# Altium footprint library MyPCBLib.PcbLib: 103 footprints (part 4 of 7)
Each footprint in its own frame and in the unit in brackets; x right, y up, seen from the top. Pads: shape width x height; smd on the part's side, far side on the other; paste and mask are expansions set on the pad; w line width, h text height; cw(c..) or ccw(c..) is an arc to the next point about the centre after c.
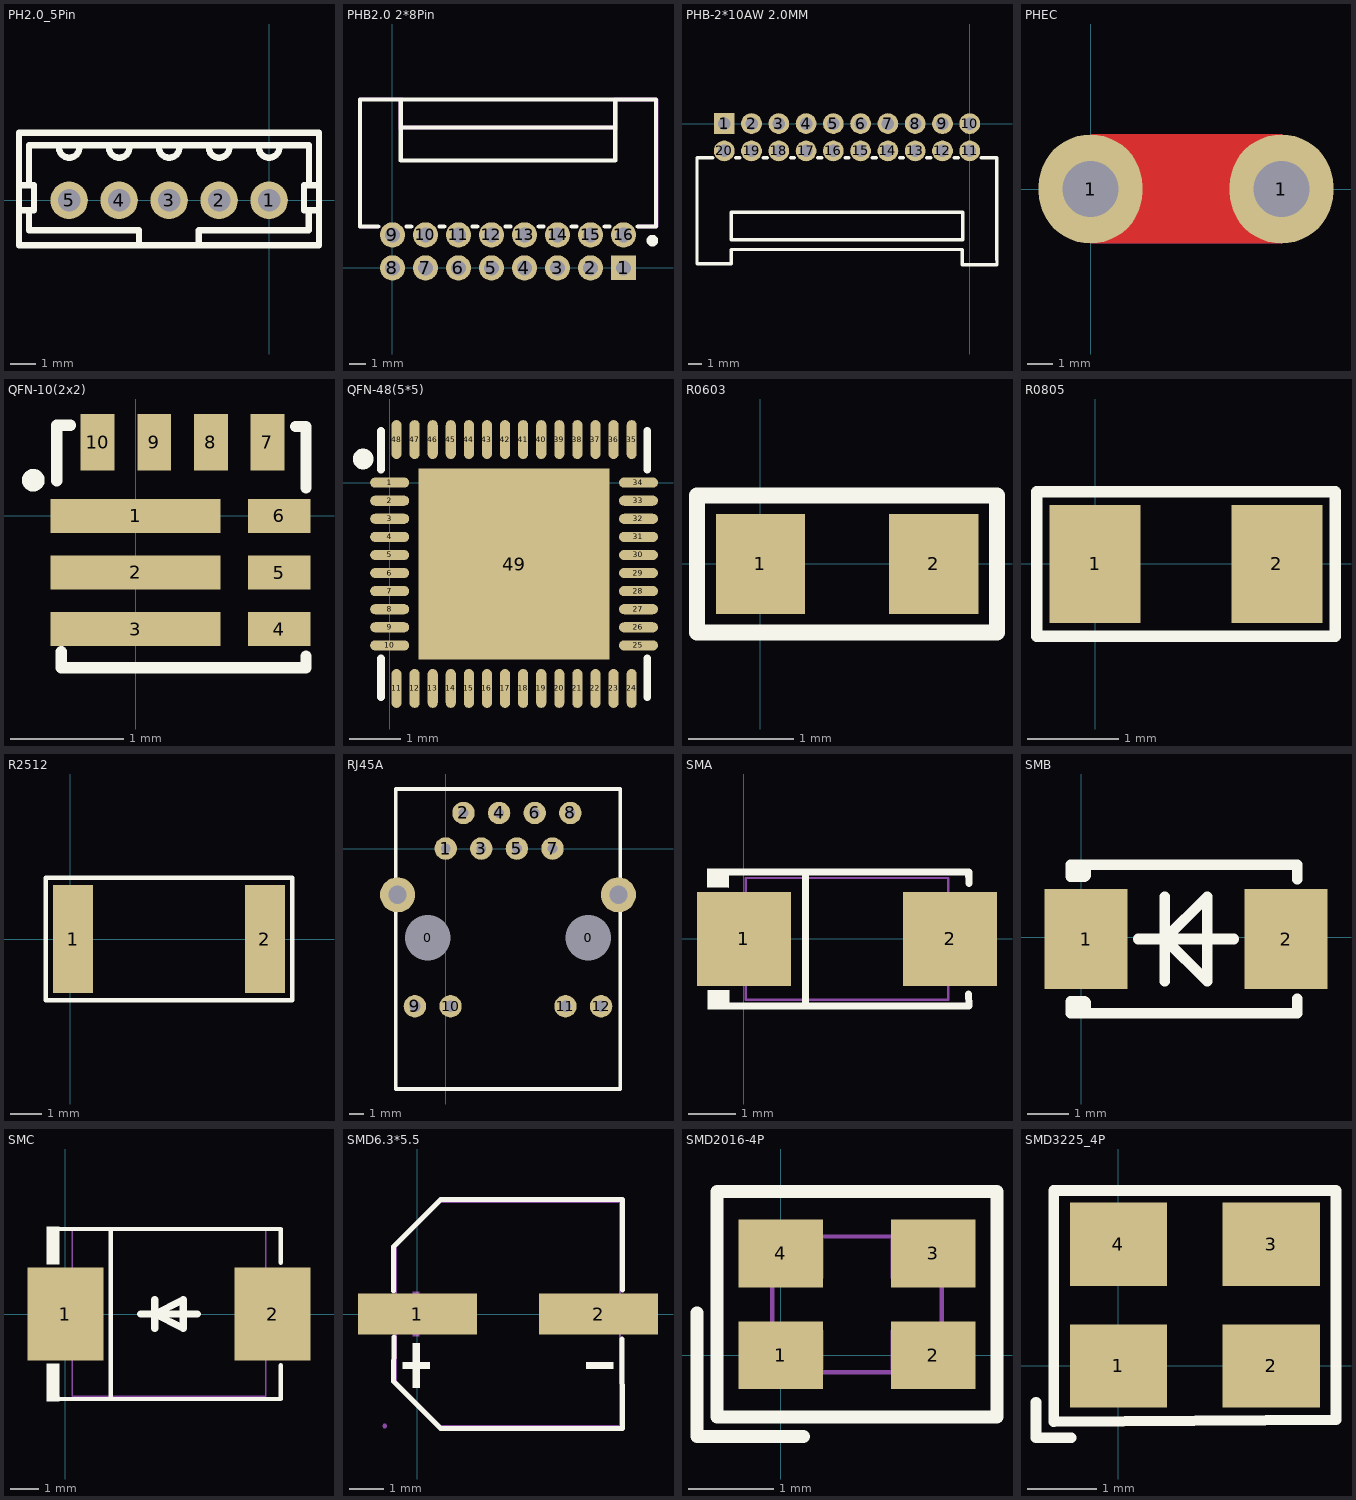
[diagram p3: the footprints below, top view; thin cyan lines are the x and y axes]

## PH2.0_5Pin [mm]
pads (5):
  round 1.5 hole 0.9: 1(0,0) 2(-2,0) 3(-4,0) 4(-6,0) 5(-8,0)
Top Overlay:
  lines w0.254: -10.002,-0.399 -9.402,-0.399 -9.402,0.601 -10.002,0.601 ; -9.601,-0.398 -9.601,-1.198 -5.201,-1.198 -5.201,-1.798 ; -9.6,0.6 -9.601,0.599 -9.601,2.202 1.598,2.202 1.598,0.602 ; -8.394,2.203 ccw(c-7.994,2.113) -7.594,2.203 ; -6.393,2.203 ccw(c-5.993,2.113) -5.593,2.203 ; -4.393,2.203 ccw(c-3.993,2.113) -3.593,2.203 ; -2.804,-1.796 -2.804,-1.196 1.596,-1.196 1.596,-0.396 ; -2.395,2.203 ccw(c-1.995,2.113) -1.595,2.203 ; -0.395,2.203 ccw(c0.005,2.113) 0.405,2.203 ; 1.998,-1.798 1.998,2.702 ; 1.998,-0.398 1.398,-0.398 1.398,0.602 1.998,0.602 ; 2,-1.799 -10,-1.799 -10,2.702 2,2.702

## PHB2.0 2*8Pin [mil]
pads (16):
  rect 59.06x59.06 hole 36: 1(551.18,-0.04)
  round 60 hole 36: 2(472.44,-0.04) 3(393.7,-0.04) 4(314.96,-0.04) 5(236.22,-0.04) 6(157.48,-0.04) 7(78.7,0) 8(0,0) 9(0,78.7) 10(78.7,78.7) 11(157.48,78.7) 12(236.22,78.7) 13(314.96,78.7) 14(393.7,78.7) 15(472.44,78.7) 16(551.18,78.7)
Top Overlay:
  circle w19.68: c620,65 r3.94
  lines w10: -33.76,98.39 -77.75,98.39 -77.75,401.53 628.94,401.53 628.94,98.58 ; 9.16,401.53 19.68,401.53 19.68,334.61 19.68,255.87 531.5,255.87 531.5,334.61 531.5,401.53 537.22,401.53 ; 19.76,334.6 531.42,334.6 ; 33.77,98.39 44.94,98.39 ; 112.47,98.39 123.72,98.39 ; 191.25,98.39 202.46,98.39 ; 269.99,98.39 281.2,98.39 ; 348.73,98.39 359.94,98.39 ; 427.47,98.39 438.68,98.39 ; 506.21,98.39 517.42,98.39 ; 584.95,98.39 628.94,98.39
Mechanical 15:
  region: 14.57,406.26 -77.95,406.26 -82.28,401.93 -82.28,97.99 -78.34,94.05 -33.46,94.05 -31.89,95.63 -31.89,100.75 -33.07,101.93 -73.62,101.93 -74.01,102.32 -74.01,397.2 -72.83,398.38 14.57,398.38
  region: 584.26,102.72 584.26,103.11 624.41,103.11 624.41,396.81 624.02,397.2 536.22,397.2 536.22,330.27 15.75,330.27 15.36,330.67 15.36,404.68 16.54,405.87 23.63,405.87 24.02,405.47 24.02,339.33 24.41,338.94 526.38,338.94 527.17,339.72 527.17,404.68 528.74,406.26 629.14,406.26 633.47,401.93 633.47,97.99 629.53,94.05 584.26,94.05 583.86,94.45 583.86,102.72 584.26,103.11

## PHB-2*10AW 2.0MM [mil]
pads (20):
  rect 60x60 hole 36: 1(-708.66,0.04)
  round 60 hole 36: 2(-629.92,0.04) 3(-551.18,0.04) 4(-472.44,0.04) 5(-393.7,0.04) 6(-314.96,0.04) 7(-236.22,0.04) 8(-157.48,0.04) 9(-78.7,0) 10(0,0) 11(0,-78.7) 12(-78.7,-78.7) 13(-157.48,-78.7) 14(-236.22,-78.7) 15(-314.96,-78.7) 16(-393.7,-78.7) 17(-472.44,-78.7) 18(-551.18,-78.7) 19(-629.92,-78.7) 20(-708.66,-78.7)
Top Overlay:
  lines w10: -742.42,-98.4 -787.33,-98.4 -787.33,-393.7 -787.33,-403.9 -688.58,-403.9 -688.58,-363.35 -21.65,-363.35 -21.65,-407.44 78.74,-407.44 78.74,-393.7 78.67,-393.7 78.67,-98.4 33.76,-98.4 ; -674.9,-98.4 -663.68,-98.4 ; -596.16,-98.4 -584.94,-98.4 ; -517.42,-98.4 -506.2,-98.4 ; -438.68,-98.4 -427.46,-98.4 ; -359.94,-98.4 -348.72,-98.4 ; -281.2,-98.4 -269.98,-98.4 ; -202.46,-98.4 -191.24,-98.4 ; -123.72,-98.4 -112.46,-98.4 ; -44.94,-98.4 -33.76,-98.4 ; -688.93,-334.6 -19.73,-334.6 -19.73,-255.9 -688.93,-255.9 -688.93,-334.6

## PHEC [mm]
pads (2):
  oval 4x4.2 hole 2.15: 1(0,0) 1(7.35,0)
Top Layer:
  region: 0.017,2.099 7.373,2.099 7.382,-2.098 -0.003,-2.099
Bottom Layer:
  region: 0.017,2.099 7.373,2.099 7.382,-2.098 -0.003,-2.099
Top Solder:
  region: 0.017,2.099 7.373,2.099 7.382,-2.098 -0.003,-2.099 0,-1.524
Bottom Solder:
  region: 0.017,2.099 7.373,2.099 7.382,-2.098 -0.003,-2.099

## QFN-10(2x2) [mm]
pads (10):
  rect 1.5x0.3 smd: 1(0,0) 2(0,-0.5) 3(0,-1)
  rect 0.55x0.3 smd: 4(1.269,-1) 5(1.269,-0.5) 6(1.269,0)
  rect 0.3x0.5 smd: 7(1.165,0.65) 8(0.665,0.65) 9(0.165,0.65) 10(-0.335,0.65)
Top Overlay:
  circle w0.1: c-0.903,0.315 r0.05
  lines w0.1: -0.695,0.31 -0.695,0.8 -0.575,0.8 ; -0.655,-1.2 -0.655,-1.34 1.505,-1.34 1.505,-1.24 ; 1.415,0.79 1.505,0.79 1.505,0.25
Mechanical 15:
  circle w0.1: c-0.645,-0.03 r0.05

## QFN-48(5*5) [mm]
pads (49):
  oval 0.755x0.196 smd paste-100 mask+0.051: 1(0,0) 2(0,-0.35) 3(0,-0.7) 4(0,-1.05) 5(0,-1.4) 6(0,-1.75) 7(0,-2.1) 8(0,-2.45) 9(0,-2.8) 10(0,-3.15) 25(4.815,-3.15) 26(4.815,-2.8) 27(4.815,-2.45) 28(4.815,-2.1) 29(4.815,-1.75) 30(4.815,-1.4) 31(4.815,-1.05) 32(4.815,-0.7) 33(4.815,-0.35) 34(4.815,0)
  oval 0.196x0.755 smd paste-100 mask+0.051: 11(0.132,-3.982) 12(0.482,-3.982) 13(0.832,-3.982) 14(1.182,-3.982) 15(1.532,-3.982) 16(1.882,-3.982) 17(2.232,-3.982) 18(2.582,-3.982) 19(2.932,-3.982) 20(3.282,-3.982) 21(3.632,-3.982) 22(3.982,-3.982) 23(4.332,-3.982) 24(4.682,-3.982) 35(4.682,0.832) 36(4.332,0.832) 37(3.982,0.832) 38(3.632,0.832) 39(3.282,0.832) 40(2.932,0.832) 41(2.582,0.832) 42(2.232,0.832) 43(1.882,0.832) 44(1.532,0.832) 45(1.182,0.832) 46(0.832,0.832) 47(0.482,0.832) 48(0.132,0.832)
  rect 3.7x3.7 smd paste-100 mask+0.051: 49(2.407,-1.575)
Top Overlay:
  circle w0.2: c-0.514,0.457 r0.1
  lines w0.152: -0.169,-4.151 -0.169,-3.4 ; -0.169,0.25 -0.169,1.001 ; 4.984,-4.151 4.984,-3.4 ; 4.984,0.25 4.984,1.001
Top Paste:
  drawing of 49 lines, arcs and shapes, not listed

## R0603 [mm]
pads (2):
  rect 0.85x0.95 smd: 1(0,0) 2(1.65,0)
Top Overlay:
  lines w0.152: -0.604,-0.654 -0.604,0.651 2.252,0.651 2.252,-0.635 2.252,-0.654 -0.604,-0.654

## R0805 [mm]
pads (2):
  rect 1x1.3 smd mask+0.08: 1(0,0) 2(2,0)
Top Overlay:
  lines w0.127: -0.643,-0.794 -0.643,0.793 2.643,0.793 2.643,-0.794 1.909,-0.794 -0.643,-0.794

## R2512 [mm]
pads (2):
  rect 1.283x3.456 smd paste-100 mask+0.051: 1(0.084,0) 2(6.216,0)
Top Overlay:
  lines w0.152: -0.786,-1.957 -0.786,1.957 0.649,1.957 5.651,1.957 7.086,1.957 7.086,-1.957 5.651,-1.957 0.649,-1.957 -0.786,-1.957
Top Paste:
  region: 0.725,-1.628 0.725,-0.688 0.625,-0.588 0.389,-0.588 0.289,-0.488 0.289,0.488 0.389,0.588 0.625,0.588 0.725,0.688 0.725,1.628 0.625,1.728 -0.458,1.728 -0.558,1.628 -0.558,-1.628 -0.458,-1.728 0.625,-1.728
  region: 5.575,-1.628 5.575,-0.688 5.675,-0.588 5.911,-0.588 6.011,-0.488 6.011,0.488 5.911,0.588 5.675,0.588 5.575,0.688 5.575,1.628 5.675,1.728 6.758,1.728 6.858,1.628 6.858,-1.628 6.758,-1.728 5.675,-1.728

## RJ45A [mm]
pads (16):
  round 1.2 hole 3.25: 0(-1.27,-6.35) 0(10.16,-6.35)
  round 1.6 hole 0.7: 1(0,0) 2(1.27,2.54) 3(2.54,0) 4(3.81,2.54) 5(5.08,0) 6(6.35,2.54) 7(7.62,0) 8(8.89,2.54)
  round 1.6 hole 0.8: 9(-2.195,-11.25) 10(0.345,-11.25) 11(8.545,-11.25) 12(11.085,-11.25)
  round 2.5 hole 1.3: ""(-3.43,-3.3) ""(12.32,-3.3)
Top Overlay:
  lines w0.254: -3.555,-17.15 12.445,-17.15 12.445,4.25 -3.555,4.25 -3.555,-17.15
3D body "User Library-HR911105A.step": height 13.6, standoff -2.9, extent -3.555,-17.15 12.325,4.25

## SMA [mm]
pads (2):
  rect 2x2 smd mask+0.051: 1(0,0) 2(4.4,0)
Top Overlay:
  region: -0.312,-1.096 -0.313,-1.503 -0.773,-1.498 -0.769,-1.096
  region: -0.32,1.502 -0.321,1.096 -0.781,1.1 -0.777,1.502
  lines w0.152: -0.396,-1.426 4.796,-1.426 ; -0.396,1.426 4.796,1.426 4.803,1.187 ; 1.316,-1.426 1.316,1.426 ; 4.793,-1.176 4.8,-1.415
Mechanical 15:
  region: 0.72,0.725 0.72,-0.725 -0.405,-0.725 -0.405,0.725
  region: 4.805,0.725 4.805,-0.725 3.68,-0.725 3.68,0.725
  region: -0.345,-1.3 -0.345,-1.275 -0.38,-1.24 -0.43,-1.24 -0.465,-1.275 -0.465,-1.3 -0.465,-1.325 -0.43,-1.36 -0.38,-1.36 -0.345,-1.325
  lines w0.051: 0.04,-1.3 4.36,-1.3 4.36,1.3 0.04,1.3 0.04,-1.3

## SMB [mil]
pads (2):
  rect 78.7x94.5 smd mask+2: 1(4.35,-1.7) 2(193.35,-1.7)
Top Overlay:
  lines w10: -1.65,63.3 -1.65,57.4 ; 3.85,-71.7 3.85,-61.7 2.95,-60.8 -1.65,-60.8 ; 53.85,-1.7 143.85,-1.7 ; 78.85,-41.7 78.85,38.3 ; 203.85,-58 203.85,-71.7 188.85,-71.7 -1.65,-71.7 ; 203.85,54.6 203.85,58.3 203.85,68.3 188.85,68.3 8.85,68.3 ; -1.65,-71.7 -1.65,-60.8 ; -1.65,-71.7 -9.95,-71.7 -9.95,-60.8 -1.65,-60.8 ; -1.65,57.4 2.95,57.4 3.85,58.3 3.85,63.3 -1.65,68.3 ; -1.65,57.4 -9.95,57.4 -9.95,68.3 -1.65,68.3 ; -1.65,68.3 8.85,68.3 ; -1.65,68.3 8.85,68.3 ; 78.85,-1.7 118.85,38.3 118.85,-41.7 78.85,-1.7

## SMC [mm]
pads (2):
  rect 2.7x3.3 smd mask+0.051: 1(0,0) 2(7.373,0)
Top Overlay:
  region: -0.214,3.102 -0.214,1.772 -0.671,1.772 -0.671,3.102
  region: -0.214,-3.102 -0.214,-1.772 -0.671,-1.772 -0.671,-3.102
  lines w0.152: -0.29,-3.026 7.662,-3.026 7.662,-1.823 ; -0.29,3.026 7.662,3.026 7.662,1.823 ; 1.617,-3.026 1.617,3.026
  lines w0.254: 2.67,0 4.702,0 ; 3.178,0.508 3.178,-0.508 3.178,0 ; 3.178,0 4.194,-0.508 4.194,0.508 3.178,0
Mechanical 15:
  region: -0.204,-2.95 -0.204,-2.925 -0.239,-2.89 -0.288,-2.89 -0.324,-2.925 -0.324,-2.95 -0.324,-2.975 -0.288,-3.01 -0.239,-3.01 -0.204,-2.975
  region: -0.264,-1.5 -0.264,1.5 0.986,1.5 0.986,-1.5
  region: 7.636,-1.5 7.636,1.5 6.386,1.5 6.386,-1.5
  lines w0.051: 0.236,-2.921 0.236,2.979 7.136,2.979 7.136,-2.921 0.236,-2.921

## SMD6.3*5.5 [mm]
pads (2):
  rect 3.5x1.2 smd mask+0.051: 1(0,0) 2(5.34,0)
Top Overlay:
  region: -0.135,-0.858 -0.135,-2.178 0.063,-2.178 0.063,-0.858
  region: -0.432,-1.419 -0.432,-1.617 0.36,-1.617 0.36,-1.419
  region: 5.772,-1.419 5.772,-1.617 4.98,-1.617 4.98,-1.419
  lines w0.152: -0.706,0.686 -0.706,1.98 0.69,3.376 6.046,3.376 6.04,0.708 ; -0.692,-0.686 -0.706,-1.981 0.689,-3.376 6.046,-3.376 6.026,-0.739
Mechanical 6:
  region: -0.14,0.66 -0.14,-0.66 0.058,-0.66 0.058,0.66
  region: -0.432,0.099 -0.432,-0.099 0.36,-0.099 0.36,0.099
  region: 5.772,0.099 5.772,-0.099 4.98,-0.099 4.98,0.099
Mechanical 15:
  region: -0.964,0.325 1.636,0.325 1.636,-0.325 -0.964,-0.325
  region: 3.737,0.325 6.337,0.325 6.337,-0.325 3.737,-0.325
  region: -0.904,-3.3 -0.904,-3.275 -0.939,-3.24 -0.989,-3.24 -1.024,-3.275 -1.024,-3.3 -1.024,-3.325 -0.989,-3.36 -0.939,-3.36 -0.904,-3.325
  lines w0.051: -0.63,-1.98 -0.63,1.98 0.69,3.3 5.97,3.3 5.97,-3.3 0.69,-3.3 -0.63,-1.98

## SMD2016-4P [mm]
pads (4):
  rect 1x0.8 smd paste+0 mask+0.051: 1(0,0) 2(1.8,0) 3(1.8,1.2) 4(0,1.2)
Top Overlay:
  lines w0.152: -0.987,0.5 -0.987,-0.957 0.27,-0.957 ; -0.751,-0.728 -0.629,-0.728 2.551,-0.728 2.551,1.928 -0.751,1.928 -0.751,-0.728
Mechanical 15:
  region: -0.04,-0.2 -0.04,-0.175 -0.075,-0.14 -0.125,-0.14 -0.16,-0.175 -0.16,-0.2 -0.16,-0.225 -0.125,-0.26 -0.075,-0.26 -0.04,-0.225
  region: 0.5,1.367 0.5,0.91 -0.075,0.91 -0.075,1.367
  region: 1.3,-0.165 1.3,0.292 1.875,0.292 1.875,-0.165
  region: -0.075,-0.165 -0.075,0.292 0.5,0.292 0.5,-0.165
  region: 1.875,1.367 1.875,0.91 1.3,0.91 1.3,1.367
  lines w0.051: -0.1,-0.2 -0.1,1.4 1.9,1.4 1.9,-0.2 -0.1,-0.2

## SMD3225_4P [mm]
pads (4):
  rect 1.4x1.2 smd: 1(0,0) 2(2.2,0) 3(2.2,1.75) 4(0,1.75)
Top Overlay:
  lines w0.152: -1.186,-0.522 -1.186,-1.03 -0.678,-1.03 ; -0.929,-0.804 -0.929,2.526 3.132,2.526 3.132,0.875 3.132,-0.776 -0.929,-0.804